# Altium schematic symbol library TPS3808G33DBVR.SchLib: 1 symbol
Pins are listed as number, name and electrical type; pins without a type are passive.

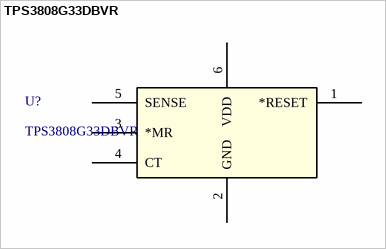
[diagram p0: symbol TPS3808G33DBVR]

## TPS3808G33DBVR
designator U?
Low-quiescent current supervisor with programmable delay & manual reset 6-SOT-23 -40 to 125; Manufacturer_Name: Texas Instruments; Copyright: Copyright (C) 2025 Ultra Librarian. All rights reserved.; Manufacturer_Part_Number: TPS3808G33DBVR; RefDes: RefDes; Type: Type
footprint DBV6
pins: 1 *RESET (oc), 2 GND (power), 3 *MR, 4 CT, 5 SENSE, 6 VDD (power)